# Altium footprint library LimeMicroAltiumLib.PcbLib: 876 footprints (part 37 of 57)
Each footprint in its own frame and in the unit in brackets; x right, y up, seen from the top. Pads: shape width x height; smd on the part's side, far side on the other; paste and mask are expansions set on the pad; w line width, h text height; cw(c..) or ccw(c..) is an arc to the next point about the centre after c.
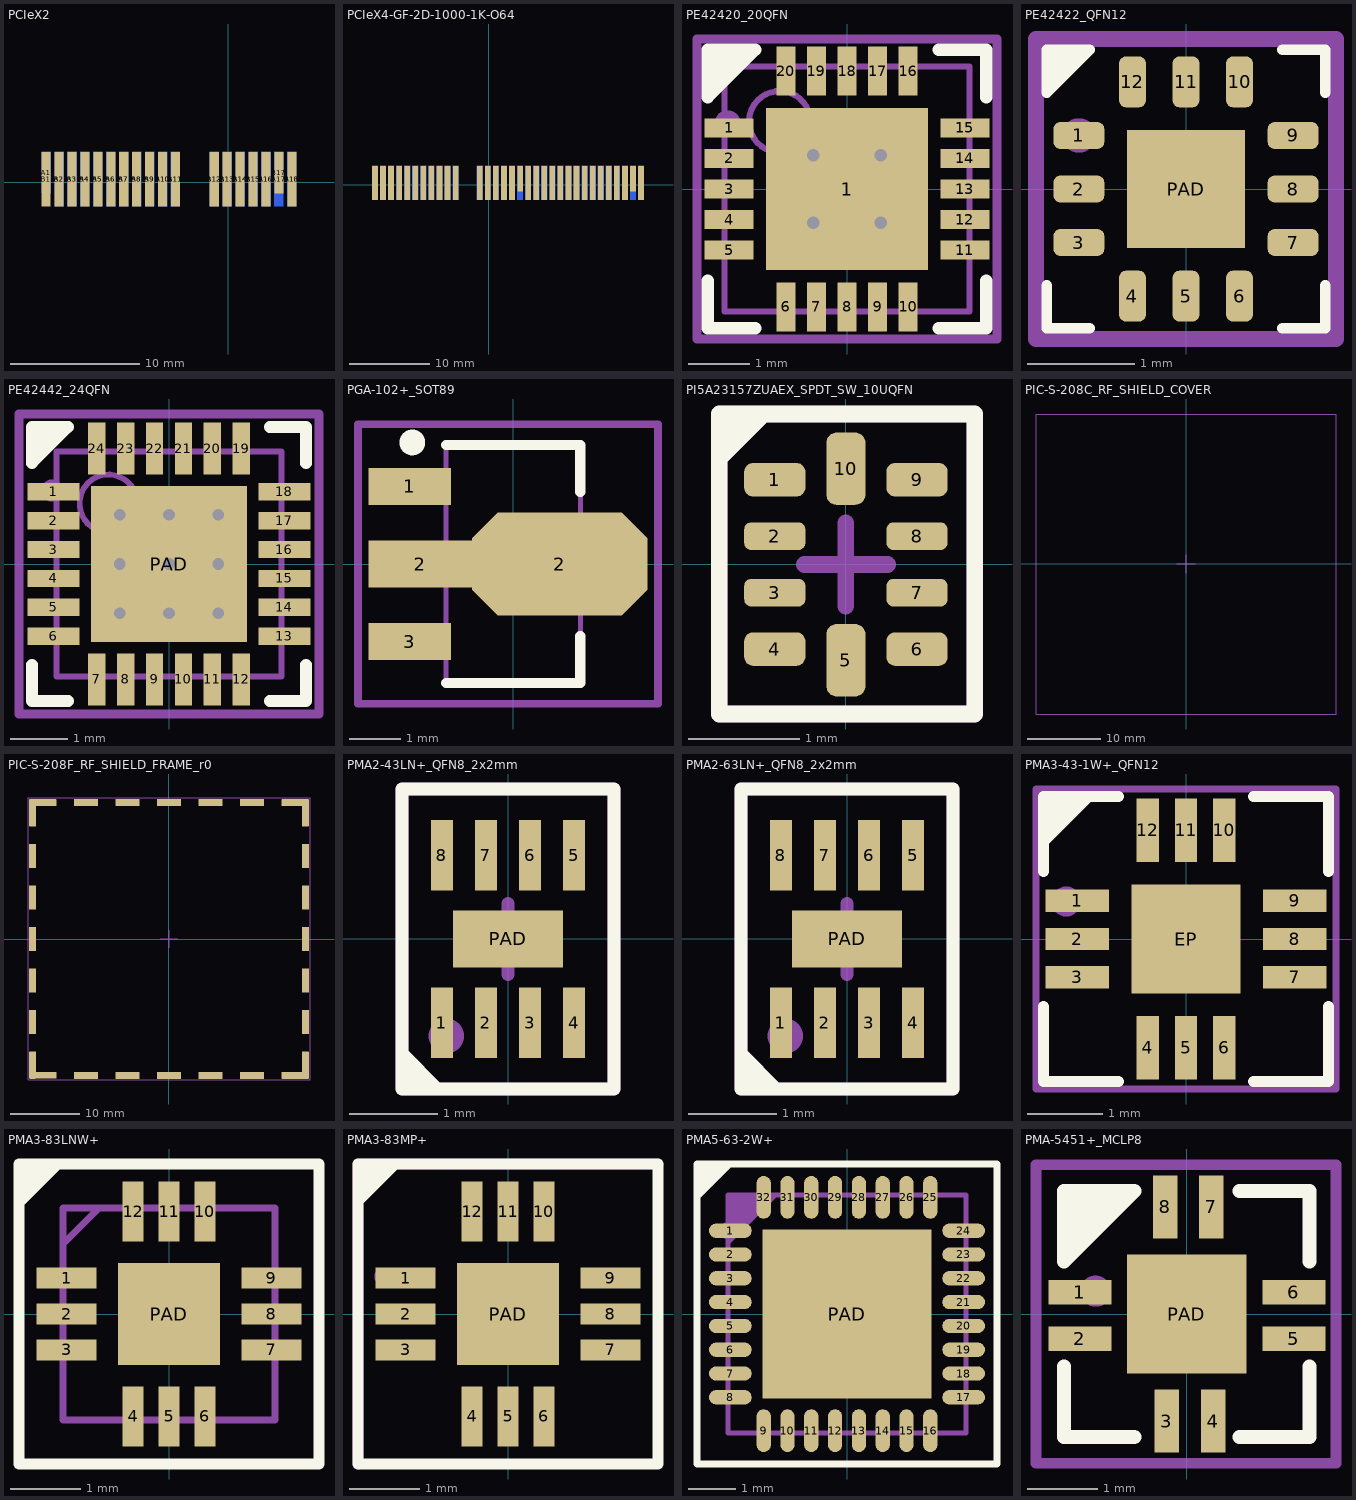
[diagram p36: the footprints below, top view; thin cyan lines are the x and y axes]

## PCIeX2 [mm]
pads (36):
  rect 0.7x3.2 smd far side: A1(-14.1,0.75)
  rect 0.7x4.2 smd far side: A2(-13.1,0.25) A3(-12.1,0.25) A4(-11.1,0.25) A5(-10.1,0.25) A6(-9.1,0.25) A7(-8.1,0.25) A8(-7.1,0.25) A9(-6.1,0.25) A10(-5.1,0.25) A11(-4.1,0.25) A12(-1.1,0.25) A13(-0.1,0.25) A14(0.9,0.25) A15(1.9,0.25) A16(2.9,0.25) A17(3.9,0.25) A18(4.9,0.25)
  rect 0.7x4.2 smd: B1(-14.1,0.25) B2(-13.1,0.25) B3(-12.1,0.25) B4(-11.1,0.25) B5(-10.1,0.25) B6(-9.1,0.25) B7(-8.1,0.25) B8(-7.1,0.25) B9(-6.1,0.25) B10(-5.1,0.25) B11(-4.1,0.25) B12(-1.1,0.25) B13(-0.1,0.25) B14(0.9,0.25) B15(1.9,0.25) B16(2.9,0.25) B18(4.9,0.25)
  rect 0.7x3.2 smd: B17(3.9,0.75)
Top Solder:
  rectangle: -15,-3.5 5.8,2.475
Bottom Solder:
  rectangle: -15,-3.5 5.8,2.475

## PCIeX4-GF-2D-1000-1K-O64 [mm]
pads (64):
  rect 0.7x3.2 smd far side: A1(-14.1,0.75)
  rect 0.7x4.2 smd far side: A2(-13.1,0.25) A3(-12.1,0.25) A4(-11.1,0.25) A5(-10.1,0.25) A6(-9.1,0.25) A7(-8.1,0.25) A8(-7.1,0.25) A9(-6.1,0.25) A10(-5.1,0.25) A11(-4.1,0.25) A12(-1.1,0.25) A13(-0.1,0.25) A14(0.9,0.25) A15(1.9,0.25) A16(2.9,0.25) A17(3.9,0.25) A18(4.9,0.25) A19(5.9,0.25) A20(6.9,0.25) A21(7.9,0.25) A22(8.9,0.25) A23(9.9,0.25) A24(10.9,0.25) A25(11.9,0.25) A26(12.9,0.25) A27(13.9,0.25) A28(14.9,0.25) A29(15.9,0.25) A30(16.9,0.25) A31(17.9,0.25) A32(18.9,0.25)
  rect 0.7x4.2 smd: B1(-14.1,0.25) B2(-13.1,0.25) B3(-12.1,0.25) B4(-11.1,0.25) B5(-10.1,0.25) B6(-9.1,0.25) B7(-8.1,0.25) B8(-7.1,0.25) B9(-6.1,0.25) B10(-5.1,0.25) B11(-4.1,0.25) B12(-1.1,0.25) B13(-0.1,0.25) B14(0.9,0.25) B15(1.9,0.25) B16(2.9,0.25) B18(4.9,0.25) B19(5.9,0.25) B20(6.9,0.25) B21(7.9,0.25) B22(8.9,0.25) B23(9.9,0.25) B24(10.9,0.25) B25(11.9,0.25) B26(12.9,0.25) B27(13.9,0.25) B28(14.9,0.25) B29(15.9,0.25) B30(16.9,0.25) B32(18.9,0.25)
  rect 0.7x3.2 smd: B17(3.9,0.75) B31(17.9,0.75)
Top Solder:
  rectangle: -15,-3.5 19.8,2.475
Bottom Solder:
  rectangle: -15,-3.5 19.8,2.475

## PE42420_20QFN [mm] "QFN, 20-Leads, Body 4,00x4,00mm, Pitch 0,50mm, Thermal Pad 2,70x2,70mm, IPC Medium Density"
height 0.8
pads (21):
  rect 0.8x0.31 smd mask+0.05: 1(-1.925,1) 2(-1.925,0.5) 3(-1.925,0) 4(-1.925,-0.5) 5(-1.925,-1) 11(1.925,-1) 12(1.925,-0.5) 13(1.925,0) 14(1.925,0.5) 15(1.925,1)
  rect 2.65x2.65 smd mask+0.05: 1(0,0)
  rect 0.31x0.8 smd mask+0.05: 6(-1,-1.925) 7(-0.5,-1.925) 8(0,-1.925) 9(0.5,-1.925) 10(1,-1.925) 16(1,1.925) 17(0.5,1.925) 18(0,1.925) 19(-0.5,1.925) 20(-1,1.925)
via 0.55,-0.55 diameter 0.4 hole 0.2
via -0.55,-0.55 diameter 0.4 hole 0.2
via 0.55,0.55 diameter 0.4 hole 0.2
via -0.55,0.55 diameter 0.4 hole 0.2
Top Overlay:
  region: -2.275,1.5 -1.5,2.275 -2.275,2.275
  lines w0.2: -2.275,-1.5 -2.275,-2.275 -1.5,-2.275 ; 1.5,-2.275 2.275,-2.275 2.275,-1.5 ; 1.5,2.275 2.275,2.275 2.275,1.5 ; -2.275,1.5 -1.5,2.275 -2.275,2.275 -2.275,1.5
Mechanical 13:
  circle w0.1: c-1.1,1.1 r0.5
  lines w0.1: -2,-2 2,-2 2,2 -2,2 -2,-2
Mechanical 15:
  circle w0.35: c-1.95,1.075 r0.035
  lines w0.15: -0.5,0 0.5,0 ; 0,-0.5 0,0.5 ; -2.45,-2.45 2.45,-2.45 2.45,2.45 -2.45,2.45 -2.45,-2.45
  text ".Designator" at 0,0 h0.55
3D body "User Library-QFN24-0_5.STEP": height 1, standoff 0, extent -2,-2 2,2

## PE42422_QFN12 [mm]
pads (13):
  rrect50% 0.475x0.25 smd mask+0.05: 1(-1,0.5) 2(-1,0) 3(-1,-0.5) 7(1,-0.5) 8(1,0) 9(1,0.5)
  rrect50% 0.25x0.475 smd mask+0.05: 4(-0.5,-1) 5(0,-1) 6(0.5,-1) 10(0.5,1) 11(0,1) 12(-0.5,1)
  rect 1.1x1.1 smd mask+0.05: PAD(0,0)
Top Overlay:
  region: -1.3,0.9 -1.3,1.3 -0.95,1.3 -0.925,1.275
  lines w0.1: -1.3,-0.9 -1.3,-1.3 -0.9,-1.3 ; 0.9,-1.3 1.3,-1.3 1.3,-0.9 ; 0.9,1.3 1.3,1.3 1.3,0.9 ; -1.3,0.9 -0.9,1.3 -1.3,1.3 -1.3,0.9
Top Solder:
  region: -0.75,-0.675
Mechanical 15:
  circle w0.25: c-1,0.5 r0.035
  lines w0.15: -0.2,0 0.2,0 ; 0,-0.2 0,0.2 ; -1.4,-1.4 1.4,-1.4 1.4,1.4 -1.4,1.4 -1.4,-1.4
  text ".Designator" at 0,0 h0.55
3D body: height 0.58, standoff 0.53, extent -0.873,0.476 -0.475,0.875
3D body: height 0.55, standoff 0, extent -1,-1 1,1

## PE42442_24QFN [mm] "QFN, 24-Leads, Body 4,00x4,00mm, Pitch 0,50mm, thermal pad, IPC Medium Density"
height 0.8
pads (25):
  rect 0.9x0.3 smd mask+0.05: 1(-2,1.25) 2(-2,0.75) 3(-2,0.25) 4(-2,-0.25) 5(-2,-0.75) 6(-2,-1.25) 13(2,-1.25) 14(2,-0.75) 15(2,-0.25) 16(2,0.25) 17(2,0.75) 18(2,1.25)
  rect 0.3x0.9 smd mask+0.05: 7(-1.25,-2) 8(-0.75,-2) 9(-0.25,-2) 10(0.25,-2) 11(0.75,-2) 12(1.25,-2) 19(1.25,2) 20(0.75,2) 21(0.25,2) 22(-0.25,2) 23(-0.75,2) 24(-1.25,2)
  rect 2.7x2.7 smd mask+0.05: PAD(0,0)
via 0.85,0.85 diameter 0.5 hole 0.2
via -0.85,0.85 diameter 0.5 hole 0.2
via 0,0.85 diameter 0.5 hole 0.2
via 0,-0.85 diameter 0.5 hole 0.2
via 0.85,-0.85 diameter 0.5 hole 0.2
via -0.85,-0.85 diameter 0.5 hole 0.2
via -0.85,0 diameter 0.5 hole 0.2
via 0.85,0 diameter 0.5 hole 0.2
via 0,0 diameter 0.5 hole 0.2
Top Overlay:
  region: -2.375,1.75 -2.375,2.375 -1.75,2.375
  lines w0.2: -2.375,-1.75 -2.375,-2.375 -1.75,-2.375 ; 1.75,-2.375 2.375,-2.375 2.375,-1.75 ; 1.75,2.375 2.375,2.375 2.375,1.75 ; -2.375,1.75 -1.75,2.375 -2.375,2.375 -2.375,1.75
Top Solder:
  region: -1.575,-1.45 -1.437,-1.588 -1.4,-1.55 -1.538,-1.412
  region: 1.575,-1.45 1.437,-1.588 1.4,-1.55 1.538,-1.412
  region: 1.575,1.45 1.437,1.588 1.4,1.55 1.538,1.412
  region: -1.575,1.45 -1.437,1.588 -1.4,1.55 -1.538,1.412
Mechanical 13:
  circle w0.1: c-1.05,1.05 r0.5
  lines w0.1: -1.95,-1.95 -1.95,1.95 1.95,1.95 1.95,-1.95 -1.95,-1.95
Mechanical 15:
  circle w0.2: c-2.025,1.275 r0.091
  lines w0.15: -0.5,0 0.5,0 ; 0,-0.5 0,0.5 ; -2.6,-2.6 -2.6,2.6 2.6,2.6 2.6,-2.6 -2.6,-2.6
  text ".Designator" at 0,0 h0.55
3D body "User Library-QFN24-0_5.STEP": height 1, standoff 0, extent -2,-2 2,2

## PGA-102+_SOT89 [mm]
pads (4):
  rect 1.6x0.711 smd: 1(-2,1.5) 3(-2,-1.5)
  rect 2x0.914 smd: 2(-1.8,0)
  oct 3.4x2 smd: 2(0.9,0)
Top Overlay:
  circle w0.25: c-1.95,2.35 r0.125
  lines w0.2: -1.3,-2.3 1.3,-2.3 1.3,-1.4 ; -1.3,2.3 1.3,2.3 1.3,1.4
Mechanical 13:
  lines w0.1: -1.3,-2.3 -1.3,2.3 1.3,2.3 1.3,-2.3 -1.3,-2.3
Mechanical 15:
  circle w0.15: c-2.125,1.5 r0.056
  lines w0.15: -0.5,0 0.5,0 ; 0,-0.5 0,0.5 ; -3,-2.7 -3,2.7 2.8,2.7 2.8,-2.7 -3,-2.7
  text ".Designator" at 0,0 h0.55
3D body "SW3dPS-SOT89.STEP": height 1.59, standoff -0.02, extent -2.408,-2.286 1.842,2.314

## PI5A23157ZUAEX_SPDT_SW_10UQFN [mm]
pads (10):
  rrect50% 0.55x0.3 smd mask+0.05: 1(-0.64,0.762) 4(-0.64,-0.762) 6(0.64,-0.762) 9(0.64,0.762)
  rrect50% 0.55x0.25 smd mask+0.05: 2(-0.64,0.254) 3(-0.64,-0.254) 7(0.64,-0.254) 8(0.64,0.254)
  rrect50% 0.35x0.65 smd mask+0.05: 5(0,-0.862) 10(0,0.862)
Top Overlay:
  region: -1.14,0.854 -0.64,1.354 -1.14,1.354
  lines w0.15: -1.14,-1.346 -1.14,1.354 1.16,1.354 1.16,-1.346 -1.14,-1.346
Mechanical 15:
  region: -1.14,0.854 -0.64,1.354 -1.14,1.354
  lines w0.15: -0.375,0 0,0 ; 0,-0.375 0,0 ; 0,0.375 0,0 ; 0.375,0 0,0 ; -1.14,-1.346 1.16,-1.346 1.16,1.354 -1.14,1.354 -1.14,-1.346
  text ".Designator" at 0,0 h0.55
3D body "User Library-10-UQFN_1_50x2_00x0_5_0_5mm_pitch.step": height 0.5, standoff 0, extent -0.75,-1 0.75,1

## PIC-S-208C_RF_SHIELD_COVER [mm] "Full footprint"
Mechanical 15:
  lines w0.15: -1.25,0 0,0 ; 0,-1.25 0,0 ; 0,1.25 0,0 ; 1.25,0 0,0 ; -20.375,-20.375 20.375,-20.375 20.375,20.375 -20.375,20.375 -20.375,-20.375
  text ".Designator" at 0,0 h0.55
3D body "PIC-S-208C_1761005544.214.step": height 7.35, standoff 4.85, extent -20.002,-20.002 20.003,20.003

## PIC-S-208F_RF_SHIELD_FRAME_r0 [mm] "Full footprint"
pads (28):
  rrect20% 1x3.5 smd mask+0.05: 0(-19.725,-11.995) 0(-19.725,-5.995) 0(-19.725,0.005) 0(-19.725,6.005) 0(-19.725,12.005) 0(19.725,-12.005) 0(19.725,-6.005) 0(19.725,-0.005) 0(19.725,5.995) 0(19.725,11.995)
  rrect20% 1x3.95 smd mask+0.05: 0(-19.705,-18.225) 0(-19.705,18.234) 0(19.705,-18.234) 0(19.705,18.225)
  rrect20% 3.95x1 smd mask+0.05: 0(-18.225,-19.695) 0(-18.225,19.705) 0(18.225,-19.705) 0(18.234,19.705)
  rrect20% 3.5x1 smd mask+0.05: 0(-12.005,-19.725) 0(-11.995,19.725) 0(-6.005,-19.725) 0(-5.995,19.725) 0(-0.005,-19.725) 0(0.005,19.725) 0(5.995,-19.725) 0(6.005,19.725) 0(11.995,-19.725) 0(12.005,19.725)
Mechanical 15:
  lines w0.15: -1.25,0 0,0 ; 0,-1.25 0,0 ; 0,1.25 0,0 ; 1.25,0 0,0 ; -20.35,-20.345 -20.35,20.405 20.4,20.405 20.4,-20.345 -20.35,-20.345
  text ".Designator" at 0,0 h0.55
3D body "PIC-S-208F_1761005145.214.step": height 7, standoff 0, extent -20.105,-20.105 20.105,20.105

## PMA2-43LN+_QFN8_2x2mm [mm]
pads (9):
  rect 0.25x0.8 smd mask+0.05: 1(-0.75,-0.95) 2(-0.25,-0.95) 3(0.25,-0.95) 4(0.75,-0.95) 5(0.75,0.95) 6(0.25,0.95) 7(-0.25,0.95) 8(-0.75,0.95)
  rect 1.25x0.65 smd mask+0.05: PAD(0,0)
Top Overlay:
  region: -0.7,-1.7 -1.2,-1.2 -1.2,-1.7
  lines w0.15: -1.2,-1.7 -1.2,1.7 1.2,1.7 1.2,-1.7 -1.2,-1.7
Mechanical 15:
  circle w0.2: c-0.7,-1.1 r0.1
  lines w0.15: -0.4,0 0,0 ; 0,-0.4 0,0 ; 0,0.4 0,0 ; 0.4,0 0,0 ; -1.2,-1.7 1.2,-1.7 1.2,1.7 -1.2,1.7 -1.2,-1.7
  text ".Designator" at 0,0 h0.55
3D body: height 1.01, standoff 0, extent -0.85,-0.849 -0.551,-0.55
3D body: height 1, standoff 0, extent -1,-1 1,1

## PMA2-63LN+_QFN8_2x2mm [mm]
pads (9):
  rect 0.25x0.8 smd mask+0.05: 1(-0.75,-0.95) 2(-0.25,-0.95) 3(0.25,-0.95) 4(0.75,-0.95) 5(0.75,0.95) 6(0.25,0.95) 7(-0.25,0.95) 8(-0.75,0.95)
  rect 1.25x0.65 smd mask+0.05: PAD(0,0)
Top Overlay:
  region: -0.7,-1.7 -1.2,-1.2 -1.2,-1.7
  lines w0.15: -1.2,-1.7 -1.2,1.7 1.2,1.7 1.2,-1.7 -1.2,-1.7
Mechanical 15:
  circle w0.2: c-0.7,-1.1 r0.1
  lines w0.15: -0.4,0 0,0 ; 0,-0.4 0,0 ; 0,0.4 0,0 ; 0.4,0 0,0 ; -1.2,-1.7 1.2,-1.7 1.2,1.7 -1.2,1.7 -1.2,-1.7
  text ".Designator" at 0,0 h0.55
3D body: height 1.01, standoff 0, extent -0.85,-0.849 -0.551,-0.55
3D body: height 1, standoff 0, extent -1,-1 1,1

## PMA3-43-1W+_QFN12 [mm]
pads (13):
  rect 0.85x0.3 smd mask+0.05: 1(-1.45,0.51) 2(-1.45,0) 3(-1.45,-0.51) 7(1.45,-0.51) 8(1.45,0) 9(1.45,0.51)
  rect 0.3x0.85 smd mask+0.05: 4(-0.51,-1.45) 5(0,-1.45) 6(0.51,-1.45) 10(0.51,1.45) 11(0,1.45) 12(-0.51,1.45)
  rect 1.45x1.45 smd mask+0.05: EP(0,0)
Top Overlay:
  region: -1.9,1.2 -1.2,1.9 -1.9,1.9
  lines w0.15: -1.9,-0.9 -1.9,-1.9 -0.9,-1.9 ; -1.9,0.9 -1.9,1.9 -0.9,1.9 ; 0.9,-1.9 1.9,-1.9 1.9,-0.9 ; 0.9,1.9 1.9,1.9 1.9,0.9
Mechanical 15:
  circle w0.2: c-1.6,0.5 r0.1
  lines w0.1: -2,-2 2,-2 2,2 -2,2 -2,-2
  lines w0.15: -0.5,0 0,0 ; 0,-0.5 0,0 ; 0,0.5 0,0 ; 0.5,0 0,0
  text ".Designator" at 0,0 h0.55
3D body "PMA3-43-1W+.stp": height 0.89, standoff 0, extent -1.5,-1.5 1.5,1.5

## PMA3-83LNW+ [mm]
height 4.5
pads (13):
  rect 0.85x0.3 smd mask+0.05: 1(-1.45,0.51) 2(-1.45,0) 3(-1.45,-0.51) 7(1.45,-0.51) 8(1.45,0) 9(1.45,0.51)
  rect 0.3x0.85 smd mask+0.05: 4(-0.51,-1.45) 5(0,-1.45) 6(0.51,-1.45) 10(0.51,1.45) 11(0,1.45) 12(-0.51,1.45)
  rect 1.45x1.45 smd mask+0.05: PAD(0,0)
Top Overlay:
  region: -2.1,1.5
  region: -2.125,2.125 -2.125,1.5 -2.1,1.5 -1.5,2.1 -1.525,2.125
  lines w0.15: -2.125,-2.125 2.125,-2.125 2.125,2.125 -2.125,2.125 -2.125,-2.125
Mechanical 13:
  lines w0.1: -1.5,0.99 -0.99,1.5 ; -1.5,-1.5 1.5,-1.5 1.5,1.5 -1.5,1.5 -1.5,-1.5
Mechanical 15:
  circle w0.127: c-1.473,0.533 r0.051
  lines w0.1: -2.125,-2.125 -2.125,2.125 2.125,2.125 2.125,-2.125 -2.125,-2.125
  lines w0.15: -0.5,0 0.5,0 ; 0,-0.5 0,0.5
  text ".Designator" at 0,0 h0.55
3D body "PMA3-83LNW+.stp": height 0.89, standoff 0, extent -1.55,-1.55 1.55,1.55

## PMA3-83MP+ [mm]
height 4.5
pads (13):
  rect 0.85x0.3 smd mask+0.05: 1(-1.45,0.51) 2(-1.45,0) 3(-1.45,-0.51) 7(1.45,-0.51) 8(1.45,0) 9(1.45,0.51)
  rect 0.3x0.85 smd mask+0.05: 4(-0.51,-1.45) 5(0,-1.45) 6(0.51,-1.45) 10(0.51,1.45) 11(0,1.45) 12(-0.51,1.45)
  rect 1.45x1.45 smd mask+0.05: PAD(0,0)
Top Overlay:
  region: -2.125,1.5 -1.5,2.125 -2.125,2.125
  lines w0.15: -2.125,-2.125 -2.125,2.125 2.125,2.125 2.125,-2.125 -2.125,-2.125
Mechanical 15:
  circle w0.127: c-1.778,0.533 r0.051
  lines w0.1: -2.125,-2.125 2.125,-2.125 2.125,2.125
  lines w0.15: -2.125,-2.125 -2.125,2.125 2.125,2.125 ; -0.5,0 0.5,0 ; 0,-0.5 0,0.5
  text ".Designator" at 0,0 h0.55
3D body "PMA3-83MP+.stp": height 0.89, standoff 0, extent -1.55,-1.55 1.55,1.55

## PMA5-63-2W+ [mm]
pads (33):
  oval 0.9x0.3 smd mask+0.05: 1(-2.45,1.75) 2(-2.45,1.25) 3(-2.45,0.75) 4(-2.45,0.25) 5(-2.45,-0.25) 6(-2.45,-0.75) 7(-2.45,-1.25) 8(-2.45,-1.75) 17(2.45,-1.75) 18(2.45,-1.25) 19(2.45,-0.75) 20(2.45,-0.25) 21(2.45,0.25) 22(2.45,0.75) 23(2.45,1.25) 24(2.45,1.75)
  oval 0.3x0.9 smd mask+0.05: 9(-1.75,-2.45) 10(-1.25,-2.45) 11(-0.75,-2.45) 12(-0.25,-2.45) 13(0.25,-2.45) 14(0.75,-2.45) 15(1.25,-2.45) 16(1.75,-2.45) 25(1.75,2.45) 26(1.25,2.45) 27(0.75,2.45) 28(0.25,2.45) 29(-0.25,2.45) 30(-0.75,2.45) 31(-1.25,2.45) 32(-1.75,2.45)
  rect 3.55x3.55 smd paste-0.65 mask+0.05: PAD(0,0)
Top Overlay:
  region: -3.15,2.375 -2.4,3.125 -2.4,3.15 -3.15,3.15
  lines w0.15: -3.15,-3.15 -3.15,3.15 3.15,3.15 3.15,-3.15 -3.15,-3.15
Mechanical 13:
  lines w0.1: -2.5,1.5 -1.5,2.5 ; -2.5,1.6 -1.6,2.5 ; -2.5,1.7 -1.7,2.5 ; -2.5,1.8 -1.8,2.5 ; -2.5,1.9 -1.9,2.5 ; -2.5,2 -2,2.5 ; -2.5,2.1 -2.1,2.5 ; -2.5,2.2 -2.2,2.5 ; -2.5,2.3 -2.3,2.5 ; -2.5,2.4 -2.4,2.5 ; -2.5,-2.5 -2.5,2.5 2.5,2.5 2.5,-2.5 -2.5,-2.5
Mechanical 15:
  circle w0.2: c-2.525,1.75 r0.071
  lines w0.1: -0.5,0 0.5,0 ; 0,-0.5 0,0.5 ; -3.15,-3.15 -3.15,3.15 3.15,3.15 3.15,-3.15 -3.15,-3.15
  text ".Designator" at 0,0 h0.55
3D body "QFN50P500X500X100-33N-S355.stp": height 1, standoff 0, extent -2.5,-2.5 2.5,2.5

## PMA-5451+_MCLP8 [mm]
pads (9):
  rect 0.9x0.35 smd mask+0.05: 1(-1.525,0.31) 2(-1.525,-0.35) 5(1.525,-0.35) 6(1.525,0.31)
  rect 0.35x0.9 smd mask+0.05: 3(-0.285,-1.525) 4(0.375,-1.525) 7(0.35,1.525) 8(-0.31,1.525)
  rect 1.7x1.7 smd mask+0.05: PAD(0,0)
Top Overlay:
  region: -1.75,0.75 -0.75,1.75 -1.75,1.75
  lines w0.2: -1.75,-0.75 -1.75,-1.75 -0.75,-1.75 ; 0.75,-1.75 1.75,-1.75 1.75,-0.75 ; 0.75,1.75 1.75,1.75 1.75,0.75 ; -1.75,0.75 -1.75,1.75 -0.75,1.75 -1.75,0.75
Mechanical 15:
  circle w0.3: c-1.3,0.325 r0.071
  lines w0.15: -0.5,0 0,0 ; 0,-0.5 0,0 ; 0,0.5 0,0 ; 0.5,0 0,0 ; -2.15,-2.125 -2.15,2.125 2.125,2.125 2.125,-2.125 -2.15,-2.125
  text ".Designator" at 0,0 h0.55
3D body: height 0.9, standoff 0, extent -1.5,-1.5 1.5,1.5
3D body: height 0.95, standoff 0.9, extent -1.198,0.801 -0.8,1.2